# Altium footprint library CoilcraftPCB.PcbLib: 320 footprints (part 14 of 20)
Each footprint in its own frame and in the unit in brackets; x right, y up, seen from the top. Pads: shape width x height; smd on the part's side, far side on the other; paste and mask are expansions set on the pad; w line width, h text height; cw(c..) or ccw(c..) is an arc to the next point about the centre after c.
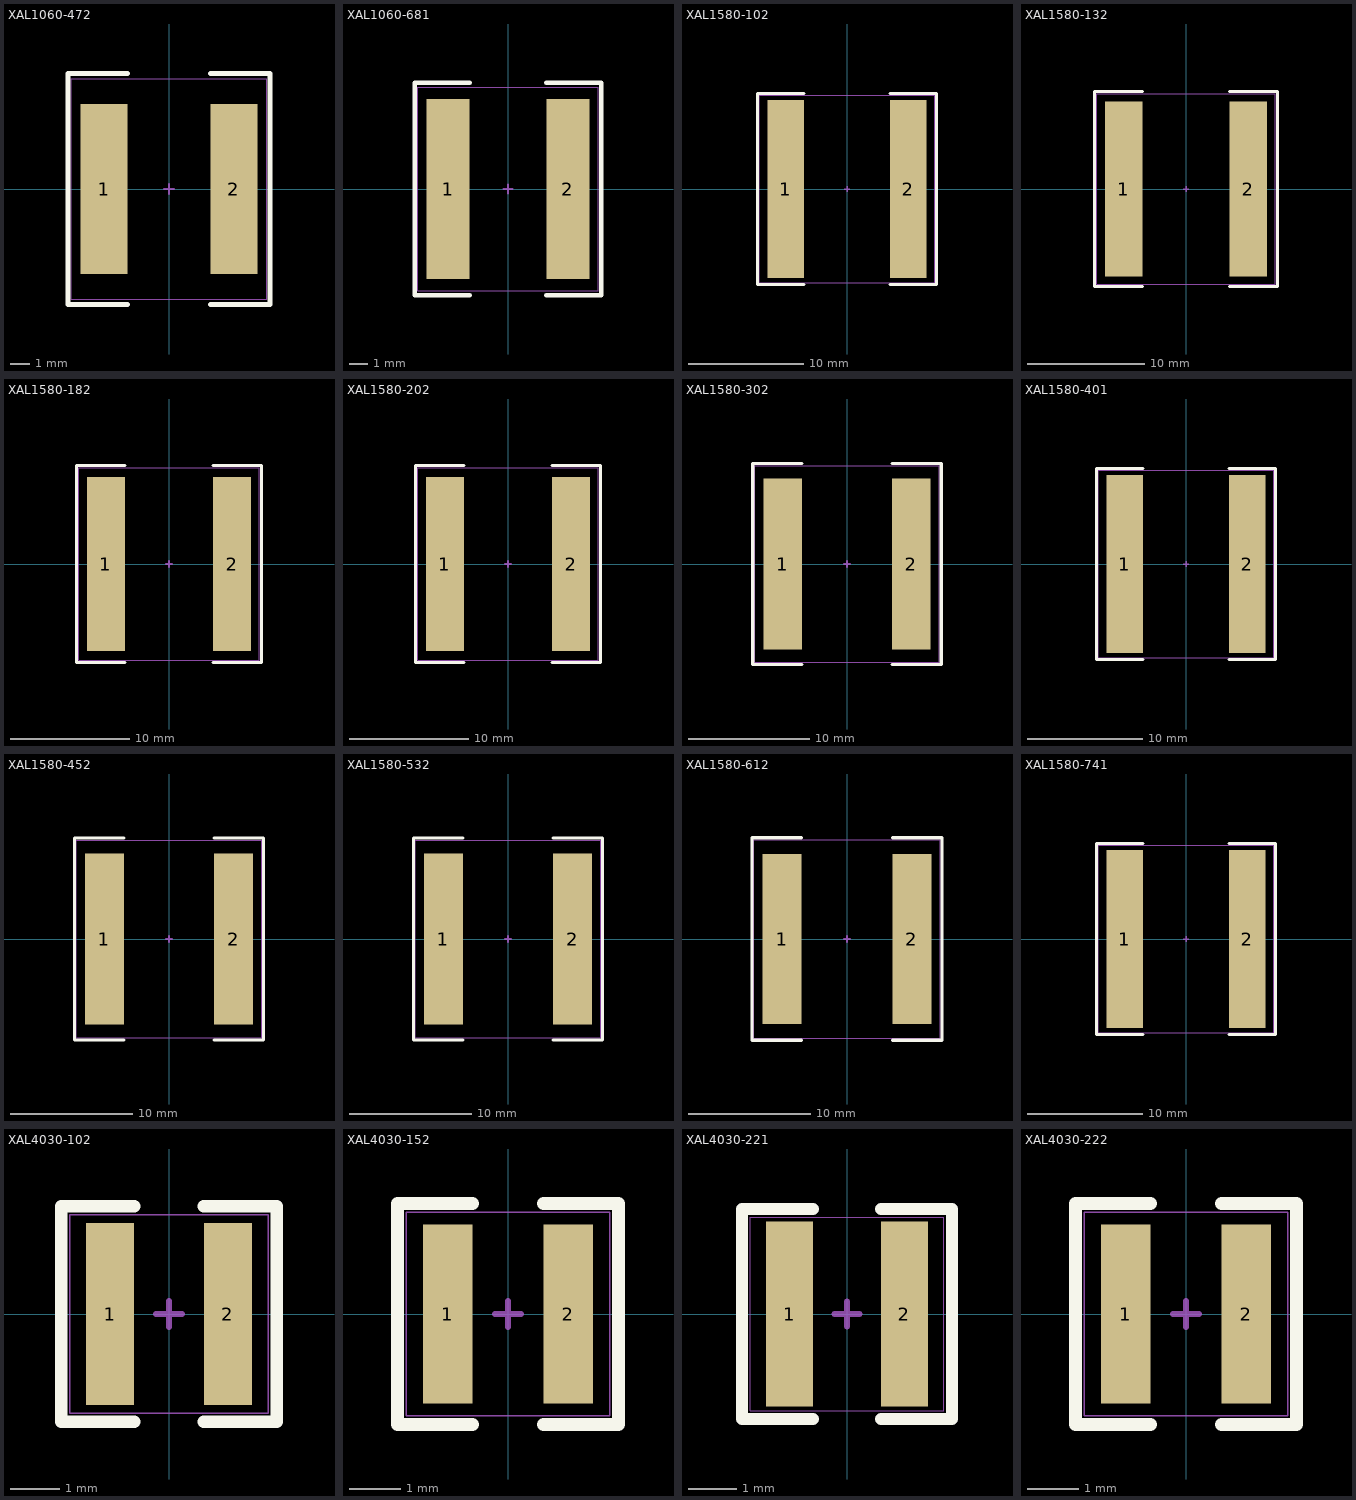
[diagram p13: the footprints below, top view; thin cyan lines are the x and y axes]

## XAL1060-472 [mil] "Coilcraft High Temperature Shielded Power Inductors"
height 236
pads (2):
  rect 94x343 smd: 1(-131,0) 2(131,0)
Top Overlay:
  lines w10: -84,-232.5 -203.5,-232.5 -203.5,232.5 -84,232.5 ; 84,-232.5 203.5,-232.5 203.5,232.5 84,232.5
Mechanical 13:
  lines w5: -10,0 10,0 ; 0,-10 0,10
Mechanical 14:
  lines w1: -197,-222.5 -197,222.5 197,222.5 197,-222.5 -197,-222.5
3D body: height 236.28, standoff 0.06, extent -206.69,-232.28 206.7,232.29

## XAL1060-681 [mil] "Coilcraft High Temperature Shielded Power Inductors"
height 236
pads (2):
  rect 94x394 smd: 1(-131,0) 2(131,0)
Top Overlay:
  lines w10: -84,-232.5 -203.5,-232.5 -203.5,232.5 -84,232.5 ; 84,-232.5 203.5,-232.5 203.5,232.5 84,232.5
Mechanical 13:
  lines w5: -10,0 10,0 ; 0,-10 0,10
Mechanical 14:
  lines w1: -197,-222.5 197,-222.5 197,222.5 -197,222.5 -197,-222.5
3D body: height 236.28, standoff 0.06, extent -206.69,-232.28 206.7,232.29

## XAL1580-102 [mil] "Coilcraft High Temperature Shielded Power Inductors"
height 323
pads (2):
  rect 125x606 smd: 1(-208.5,0) 2(208.5,0)
Top Overlay:
  lines w10: -146,-325.5 -305.5,-325.5 -305.5,325.5 -146,325.5 ; 146,-325.5 305.5,-325.5 305.5,325.5 146,325.5
Mechanical 13:
  lines w5: -10,0 10,0 ; 0,-10 0,10
Mechanical 14:
  lines w1: -299,-319 299,-319 299,319 -299,319 -299,-319
3D body: height 322.9, standoff 0.06, extent -303.15,-322.83 303.15,322.84

## XAL1580-132 [mil] "Coilcraft High Temperature Shielded Power Inductors"
height 315
pads (2):
  rect 125x587 smd: 1(-208.5,0) 2(208.5,0)
Top Overlay:
  lines w10: -146,-325.5 -305.5,-325.5 -305.5,325.5 -146,325.5 ; 146,-325.5 305.5,-325.5 305.5,325.5 146,325.5
Mechanical 13:
  lines w5: -10,0 10,0 ; 0,-10 0,10
Mechanical 14:
  lines w1: -299,-319 299,-319 299,319 -299,319 -299,-319
3D body: height 315.02, standoff 0.06, extent -303.15,-322.83 303.15,322.84

## XAL1580-182 [mil] "Coilcraft High Temperature Shielded Power Inductors"
height 315
pads (2):
  rect 125x575 smd: 1(-208.5,0) 2(208.5,0)
Top Overlay:
  lines w10: -146,-325.5 -305.5,-325.5 -305.5,325.5 -146,325.5 ; 146,-325.5 305.5,-325.5 305.5,325.5 146,325.5
Mechanical 13:
  lines w5: -10,0 10,0 ; 0,-10 0,10
Mechanical 14:
  lines w1: -299,-319 -299,319 299,319 299,-319 -299,-319
3D body: height 315.02, standoff 0.06, extent -303.15,-322.83 303.15,322.84

## XAL1580-202 [mil] "Coilcraft High Temperature Shielded Power Inductors"
height 315
pads (2):
  rect 125x575 smd: 1(-208.5,0) 2(208.5,0)
Top Overlay:
  lines w10: -146,-325.5 -305.5,-325.5 -305.5,325.5 -146,325.5 ; 146,-325.5 305.5,-325.5 305.5,325.5 146,325.5
Mechanical 13:
  lines w5: -10,0 10,0 ; 0,-10 0,10
Mechanical 14:
  lines w1: -299,-319 299,-319 299,319 -299,319 -299,-319
3D body: height 315.02, standoff 0.06, extent -303.15,-322.83 303.15,322.84

## XAL1580-302 [mil] "Coilcraft High Temperature Shielded Power Inductors"
height 315
pads (2):
  rect 125x555 smd: 1(-208.5,0) 2(208.5,0)
Top Overlay:
  lines w10: -146,-325.5 -305.5,-325.5 -305.5,325.5 -146,325.5 ; 146,-325.5 305.5,-325.5 305.5,325.5 146,325.5
Mechanical 13:
  lines w5: -10,0 10,0 ; 0,-10 0,10
Mechanical 14:
  lines w1: -299,-319 -299,319 299,319 299,-319 -299,-319
3D body: height 315.02, standoff 0.06, extent -303.15,-322.83 303.15,322.84

## XAL1580-401 [mil] "Coilcraft High Temperature Shielded Power Inductors"
height 323
pads (2):
  rect 125x606 smd: 1(-208.5,0) 2(208.5,0)
Top Overlay:
  lines w10: -146,-325.5 -305.5,-325.5 -305.5,325.5 -146,325.5 ; 146,-325.5 305.5,-325.5 305.5,325.5 146,325.5
Mechanical 13:
  lines w5: -10,0 10,0 ; 0,-10 0,10
Mechanical 14:
  lines w1: -299,-319 -299,319 299,319 299,-319 -299,-319
3D body: height 322.9, standoff 0.06, extent -303.15,-322.83 303.15,322.84

## XAL1580-452 [mil] "Coilcraft High Temperature Shielded Power Inductors"
height 315
pads (2):
  rect 125x551 smd: 1(-208.5,0) 2(208.5,0)
Top Overlay:
  lines w10: -146,-325.5 -305.5,-325.5 -305.5,325.5 -146,325.5 ; 146,-325.5 305.5,-325.5 305.5,325.5 146,325.5
Mechanical 13:
  lines w5: -10,0 10,0 ; 0,-10 0,10
Mechanical 14:
  lines w1: -299,-319 299,-319 299,319 -299,319 -299,-319
3D body: height 315.02, standoff 0.06, extent -303.15,-322.83 303.15,322.84

## XAL1580-532 [mil] "Coilcraft High Temperature Shielded Power Inductors"
height 315
pads (2):
  rect 125x551 smd: 1(-208.5,0) 2(208.5,0)
Top Overlay:
  lines w10: -146,-325.5 -305.5,-325.5 -305.5,325.5 -146,325.5 ; 146,-325.5 305.5,-325.5 305.5,325.5 146,325.5
Mechanical 13:
  lines w5: -10,0 10,0 ; 0,-10 0,10
Mechanical 14:
  lines w1: -299,-319 -299,319 299,319 299,-319 -299,-319
3D body: height 315.02, standoff 0.06, extent -303.15,-322.83 303.15,322.84

## XAL1580-612 [mil] "Coilcraft High Temperature Shielded Power Inductors"
height 315
pads (2):
  rect 125x547 smd: 1(-208.5,0) 2(208.5,0)
Top Overlay:
  lines w10: -146,-325.5 -305.5,-325.5 -305.5,325.5 -146,325.5 ; 146,-325.5 305.5,-325.5 305.5,325.5 146,325.5
Mechanical 13:
  lines w5: -10,0 10,0 ; 0,-10 0,10
Mechanical 14:
  lines w1: -299,-319 299,-319 299,319 -299,319 -299,-319
3D body: height 315.02, standoff 0.06, extent -303.15,-322.83 303.15,322.84

## XAL1580-741 [mil] "Coilcraft High Temperature Shielded Power Inductors"
height 323
pads (2):
  rect 125x606 smd: 1(-208.5,0) 2(208.5,0)
Top Overlay:
  lines w10: -146,-325.5 -305.5,-325.5 -305.5,325.5 -146,325.5 ; 146,-325.5 305.5,-325.5 305.5,325.5 146,325.5
Mechanical 13:
  lines w5: -10,0 10,0 ; 0,-10 0,10
Mechanical 14:
  lines w1: -299,-319 299,-319 299,319 -299,319 -299,-319
3D body: height 322.9, standoff 0.06, extent -303.15,-322.83 303.15,322.84

## XAL4030-102 [mil] "Coilcraft High Temperature Shielded Power Inductors"
height 122
pads (2):
  rect 38x144 smd: 1(-46.5,0) 2(46.5,0)
Top Overlay:
  lines w10: -27.5,-85 -85,-85 -85,85 -27.5,85 ; 27.5,-85 85,-85 85,85 27.5,85
Mechanical 13:
  lines w5: -10,0 10,0 ; 0,-10 0,10
Mechanical 14:
  lines w1: -78.5,-78.5 78.5,-78.5 78.5,78.5 -78.5,78.5 -78.5,-78.5
3D body: height 122.11, standoff 0.06, extent -84.64,-84.64 84.65,84.65

## XAL4030-152 [mil] "Coilcraft High Temperature Shielded Power Inductors"
height 122
pads (2):
  rect 38x138 smd: 1(-46.5,0) 2(46.5,0)
Top Overlay:
  lines w10: -27.5,-85 -85,-85 -85,85 -27.5,85 ; 27.5,-85 85,-85 85,85 27.5,85
Mechanical 13:
  lines w5: -10,0 10,0 ; 0,-10 0,10
Mechanical 14:
  lines w1: -78.5,-78.5 -78.5,78.5 78.5,78.5 78.5,-78.5 -78.5,-78.5
3D body: height 122.11, standoff 0.06, extent -84.65,-84.65 84.64,84.64

## XAL4030-221 [mil] "Coilcraft High Temperature Shielded Power Inductors"
height 122
pads (2):
  rect 38x150 smd: 1(-46.5,0) 2(46.5,0)
Top Overlay:
  lines w10: -27.5,-85 -85,-85 -85,85 -27.5,85 ; 27.5,-85 85,-85 85,85 27.5,85
Mechanical 13:
  lines w5: -10,0 10,0 ; 0,-10 0,10
Mechanical 14:
  lines w1: -78.5,-78.5 78.5,-78.5 78.5,78.5 -78.5,78.5 -78.5,-78.5
3D body: height 122.11, standoff 0.06, extent -84.65,-84.65 84.64,84.64

## XAL4030-222 [mil] "Coilcraft High Temperature Shielded Power Inductors"
height 122
pads (2):
  rect 38x138 smd: 1(-46.5,0) 2(46.5,0)
Top Overlay:
  lines w10: -27.5,-85 -85,-85 -85,85 -27.5,85 ; 27.5,-85 85,-85 85,85 27.5,85
Mechanical 13:
  lines w5: -10,0 10,0 ; 0,-10 0,10
Mechanical 14:
  lines w1: -78.5,-78.5 -78.5,78.5 78.5,78.5 78.5,-78.5 -78.5,-78.5
3D body: height 122.11, standoff 0.06, extent -84.65,-84.65 84.64,84.64